# Altium integrated library Capacitor 1206 22uF 25V.IntLib: 1 symbol
Pins are listed as number, name and electrical type; pins without a type are passive.

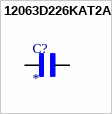
[diagram p0: symbol 12063D226KAT2A]

## 12063D226KAT2A
designator C?
MF: {'manufacturer': u'KYOCERA AVX'}; MP: 12063D226KAT2A; Package: None; Price: None; Value: *; Availability: Unavailable
footprint CAPC3216X229N
pins: 1, 2